# Altium footprint library WR-BHD.PcbLib: 220 footprints (part 6 of 14)
Each footprint in its own frame and in the unit in brackets; x right, y up, seen from the top. Pads: shape width x height; smd on the part's side, far side on the other; paste and mask are expansions set on the pad; w line width, h text height; cw(c..) or ccw(c..) is an arc to the next point about the centre after c.
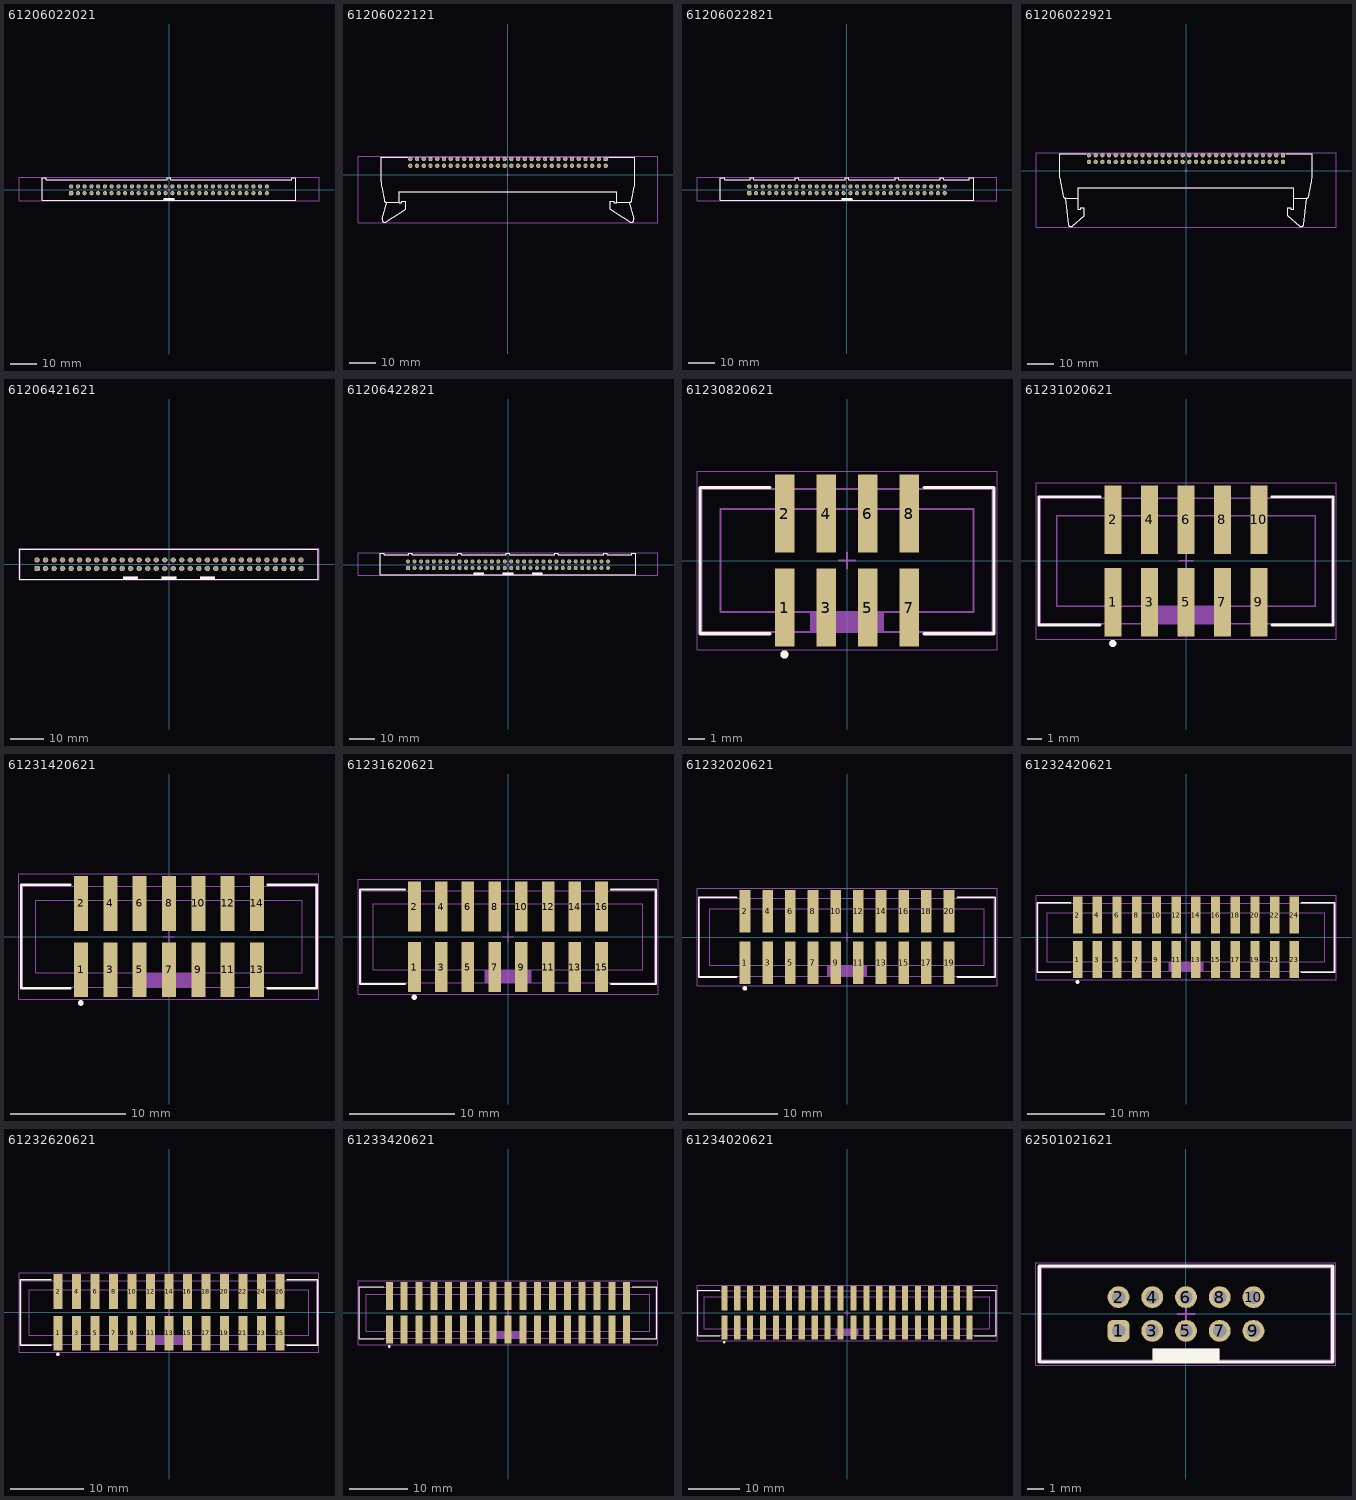
[diagram p5: the footprints below, top view; thin cyan lines are the x and y axes]

## 61206022021 [mm] "60 pins, straight, short lever, gold plating"
height 24.5
pads (60):
  rrect50% 1.6x1.6 hole 1.02: 1(-36.83,-1.27)
  round 1.6 hole 1.02: 2(-36.83,1.27) 3(-34.29,-1.27) 4(-34.29,1.27) 5(-31.75,-1.27) 6(-31.75,1.27) 7(-29.21,-1.27) 8(-29.21,1.27) 9(-26.67,-1.27) 10(-26.67,1.27) 11(-24.13,-1.27) 12(-24.13,1.27) 13(-21.59,-1.27) 14(-21.59,1.27) 15(-19.05,-1.27) 16(-19.05,1.27) 17(-16.51,-1.27) 18(-16.51,1.27) 19(-13.97,-1.27) 20(-13.97,1.27) 21(-11.43,-1.27) 22(-11.43,1.27) 23(-8.89,-1.27) 24(-8.89,1.27) 25(-6.35,-1.27) 26(-6.35,1.27) 27(-3.81,-1.27) 28(-3.81,1.27) 29(-1.27,-1.27) 30(-1.27,1.27) 31(1.27,-1.27) 32(1.27,1.27) 33(3.81,-1.27) 34(3.81,1.27) 35(6.35,-1.27) 36(6.35,1.27) 37(8.89,-1.27) 38(8.89,1.27) 39(11.43,-1.27) 40(11.43,1.27) 41(13.97,-1.27) 42(13.97,1.27) 43(16.51,-1.27) 44(16.51,1.27) 45(19.05,-1.27) 46(19.05,1.27) 47(21.59,-1.27) 48(21.59,1.27) 49(24.13,-1.27) 50(24.13,1.27) 51(26.67,-1.27) 52(26.67,1.27) 53(29.21,-1.27) 54(29.21,1.27) 55(31.75,-1.27) 56(31.75,1.27) 57(34.29,-1.27) 58(34.29,1.27) 59(36.83,-1.27) 60(36.83,1.27)
Top Overlay:
  rectangle: -2.1,-3.85 2.1,-3.05
  lines w0.2: -0.7,4.45 0.7,4.45 0.7,3.85 46.2,3.85 46.2,4.45 47.75,4.45 47.75,-3.85 -47.75,-3.85 -47.75,4.45 -46.2,4.45 -46.2,3.85 -0.7,3.85 -0.7,4.45 ; -0.7,4.45 -0.7,4.45
Top Assembly:
  rectangle: -2.1,-3.85 2.1,-3.05
  lines w0.1: -0.7,4.45 -0.7,3.85 -46.2,3.85 -46.2,4.45 -47.75,4.45 -47.75,-3.85 47.75,-3.85 47.75,4.45 46.2,4.45 46.2,3.85 0.7,3.85 0.7,4.45 -0.7,4.45 ; -0.7,4.45 -0.7,4.45
Top Designator:
  text ".Designator" at -3.647,-0.357 h1
Top 3D Body:
  rectangle: -2.1,-3.85 2.1,-3.05
  lines w0.1: -0.7,4.45 0.7,4.45 0.7,3.85 46.2,3.85 46.2,4.45 47.75,4.45 47.75,-3.85 -47.75,-3.85 -47.75,4.45 -46.2,4.45 -46.2,3.85 -0.7,3.85 -0.7,4.45 ; -0.7,4.45 -0.7,4.45
Top Courtyard:
  lines w0.05: -56.45,-4.05 -56.45,4.65 56.45,4.65 56.45,-4.05 -56.45,-4.05
Top Component Center:
  lines w0.1: -0.5,0 0.5,0 ; 0,-0.5 0,0.5
3D body "61206022021.stp": height 24.55, standoff -3.35, extent -47.849,-3.85 47.851,4.45

## 61206022121 [mm] "60 pins, right angeled, short lever, gold plating"
height 8.3
pads (60):
  rrect50% 1.65x1.65 hole 1.1: 1(36.83,5.88)
  round 1.65 hole 1.1: 2(36.83,3.34) 3(34.29,5.88) 4(34.29,3.34) 5(31.75,5.88) 6(31.75,3.34) 7(29.21,5.88) 8(29.21,3.34) 9(26.67,5.88) 10(26.67,3.34) 11(24.13,5.88) 12(24.13,3.34) 13(21.59,5.88) 14(21.59,3.34) 15(19.05,5.88) 16(19.05,3.34) 17(16.51,5.88) 18(16.51,3.34) 19(13.97,5.88) 20(13.97,3.34) 21(11.43,5.88) 22(11.43,3.34) 23(8.89,5.88) 24(8.89,3.34) 25(6.35,5.88) 26(6.35,3.34) 27(3.81,5.88) 28(3.81,3.34) 29(1.27,5.88) 30(1.27,3.34) 31(-1.27,5.88) 32(-1.27,3.34) 33(-3.81,5.88) 34(-3.81,3.34) 35(-6.35,5.88) 36(-6.35,3.34) 37(-8.89,5.88) 38(-8.89,3.34) 39(-11.43,5.88) 40(-11.43,3.34) 41(-13.97,5.88) 42(-13.97,3.34) 43(-16.51,5.88) 44(-16.51,3.34) 45(-19.05,5.88) 46(-19.05,3.34) 47(-21.59,5.88) 48(-21.59,3.34) 49(-24.13,5.88) 50(-24.13,3.34) 51(-26.67,5.88) 52(-26.67,3.34) 53(-29.21,5.88) 54(-29.21,3.34) 55(-31.75,5.88) 56(-31.75,3.34) 57(-34.29,5.88) 58(-34.29,3.34) 59(-36.83,5.88) 60(-36.83,3.34)
Top Overlay:
  lines w0.2: -46.714,-9.501 -47.656,-4.611 cw(c-37.85,-2.65) -47.85,-2.65 -47.85,6.5 -37.75,6.5 ; -46.71,-9.5 ccw(c-45.71,-9.5) -45.71,-10.5 ; -45.805,-10.5 -41.05,-10.5 ; -45.624,-10.601 -47.457,-16.691 ccw(c-46.5,-16.98) -45.95,-17.815 -38.55,-13.08 -38.55,-9.98 -40.05,-9.98 -40.05,-10.69 -41.05,-10.69 -41.05,-6.5 41.05,-6.5 41.05,-10.69 40.05,-10.69 40.05,-9.98 38.55,-9.98 38.55,-13.08 45.95,-17.816 ccw(c46.5,-16.98) 47.457,-16.691 45.624,-10.601 ; 38,6.5 47.85,6.5 47.85,-2.65 cw(c37.85,-2.65) 47.656,-4.611 46.714,-9.501 ; 41.05,-10.5 45.805,-10.5 ; 45.71,-10.5 ccw(c45.71,-9.5) 46.71,-9.5
Top Assembly:
  lines w0.1: -46.714,-9.501 -47.656,-4.611 cw(c-37.85,-2.65) -47.85,-2.65 -47.85,6.5 47.85,6.5 47.85,-2.65 cw(c37.85,-2.65) 47.656,-4.611 46.714,-9.501 ; -46.71,-9.5 ccw(c-45.71,-9.5) -45.71,-10.5 ; -45.805,-10.5 -41.05,-10.5 ; -45.624,-10.601 -47.457,-16.691 ccw(c-46.5,-16.98) -45.95,-17.815 -38.55,-13.08 -38.55,-9.98 -40.05,-9.98 -40.05,-10.69 -41.05,-10.69 -41.05,-6.5 41.05,-6.5 41.05,-10.69 40.05,-10.69 40.05,-9.98 38.55,-9.98 38.55,-13.08 45.95,-17.816 ccw(c46.5,-16.98) 47.457,-16.691 45.624,-10.601 ; 41.05,-10.5 45.805,-10.5 ; 45.71,-10.5 ccw(c45.71,-9.5) 46.71,-9.5
Top Designator:
  text ".Designator" at -3.647,-0.357 h1
Top 3D Body:
  lines w0.1: -46.714,-9.501 -47.656,-4.611 cw(c-37.85,-2.65) -47.85,-2.65 -47.85,6.5 47.85,6.5 47.85,-2.65 cw(c37.85,-2.65) 47.656,-4.611 46.714,-9.501 ; -46.71,-9.5 ccw(c-45.71,-9.5) -45.71,-10.5 ; -45.805,-10.5 -41.05,-10.5 ; -45.624,-10.601 -47.457,-16.691 ccw(c-46.5,-16.98) -45.95,-17.815 -38.55,-13.08 -38.55,-9.98 -40.05,-9.98 -40.05,-10.69 -41.05,-10.69 -41.05,-6.5 41.05,-6.5 41.05,-10.69 40.05,-10.69 40.05,-9.98 38.55,-9.98 38.55,-13.08 45.95,-17.816 ccw(c46.5,-16.98) 47.457,-16.691 45.624,-10.601 ; 41.05,-10.5 45.805,-10.5 ; 45.71,-10.5 ccw(c45.71,-9.5) 46.71,-9.5
Top Courtyard:
  lines w0.05: -56.55,-18.2 -56.55,6.88 56.55,6.88 56.55,-18.2 -56.55,-18.2
Top Component Center:
  lines w0.1: -0.5,0 0.5,0 ; 0,-0.5 0,0.5
3D body "61206022121.stp": height 8.35, standoff -3.35, extent -47.85,-18 47.85,6.5

## 61206022821 [mm] "60 pins, straight, long lever, gold plating"
height 28
pads (60):
  rrect50% 1.6x1.6 hole 1.02: 1(-36.83,-1.27)
  round 1.6 hole 1.02: 2(-36.83,1.27) 3(-34.29,-1.27) 4(-34.29,1.27) 5(-31.75,-1.27) 6(-31.75,1.27) 7(-29.21,-1.27) 8(-29.21,1.27) 9(-26.67,-1.27) 10(-26.67,1.27) 11(-24.13,-1.27) 12(-24.13,1.27) 13(-21.59,-1.27) 14(-21.59,1.27) 15(-19.05,-1.27) 16(-19.05,1.27) 17(-16.51,-1.27) 18(-16.51,1.27) 19(-13.97,-1.27) 20(-13.97,1.27) 21(-11.43,-1.27) 22(-11.43,1.27) 23(-8.89,-1.27) 24(-8.89,1.27) 25(-6.35,-1.27) 26(-6.35,1.27) 27(-3.81,-1.27) 28(-3.81,1.27) 29(-1.27,-1.27) 30(-1.27,1.27) 31(1.27,-1.27) 32(1.27,1.27) 33(3.81,-1.27) 34(3.81,1.27) 35(6.35,-1.27) 36(6.35,1.27) 37(8.89,-1.27) 38(8.89,1.27) 39(11.43,-1.27) 40(11.43,1.27) 41(13.97,-1.27) 42(13.97,1.27) 43(16.51,-1.27) 44(16.51,1.27) 45(19.05,-1.27) 46(19.05,1.27) 47(21.59,-1.27) 48(21.59,1.27) 49(24.13,-1.27) 50(24.13,1.27) 51(26.67,-1.27) 52(26.67,1.27) 53(29.21,-1.27) 54(29.21,1.27) 55(31.75,-1.27) 56(31.75,1.27) 57(34.29,-1.27) 58(34.29,1.27) 59(36.83,-1.27) 60(36.83,1.27)
Top Overlay:
  rectangle: -2.1,-3.85 2.1,-3.04
  lines w0.2: -47.85,-3.85 -47.85,4.45 -46.12,4.45 -46.12,3.85 -36.55,3.85 -36.55,4.45 -35.15,4.45 -35.15,3.85 -19.5,3.85 -19.5,4.45 -18.1,4.45 -18.1,3.85 -0.7,3.85 -0.7,4.45 0.7,4.45 0.7,3.85 18.1,3.85 18.1,4.45 19.5,4.45 19.5,3.85 35.15,3.85 35.15,4.45 36.55,4.45 36.55,3.85 46.12,3.85 46.12,4.45 47.85,4.45 47.85,-3.85 -47.85,-3.85
Top Assembly:
  rectangle: -2.1,-3.85 2.1,-3.04
  lines w0.1: -47.85,-3.85 47.85,-3.85 47.85,4.45 46.12,4.45 46.12,3.85 36.55,3.85 36.55,4.45 35.15,4.45 35.15,3.85 19.5,3.85 19.5,4.45 18.1,4.45 18.1,3.85 0.7,3.85 0.7,4.45 -0.7,4.45 -0.7,3.85 -18.1,3.85 -18.1,4.45 -19.5,4.45 -19.5,3.85 -35.15,3.85 -35.15,4.45 -36.55,4.45 -36.55,3.85 -46.12,3.85 -46.12,4.45 -47.85,4.45 -47.85,-3.85
Top Designator:
  text ".Designator" at -3.647,-0.357 h1
Top 3D Body:
  rectangle: -2.1,-3.85 2.1,-3.04
  lines w0.1: -47.85,-3.85 -47.85,4.45 -46.12,4.45 -46.12,3.85 -36.55,3.85 -36.55,4.45 -35.15,4.45 -35.15,3.85 -19.5,3.85 -19.5,4.45 -18.1,4.45 -18.1,3.85 -0.7,3.85 -0.7,4.45 0.7,4.45 0.7,3.85 18.1,3.85 18.1,4.45 19.5,4.45 19.5,3.85 35.15,3.85 35.15,4.45 36.55,4.45 36.55,3.85 46.12,3.85 46.12,4.45 47.85,4.45 47.85,-3.85 -47.85,-3.85
Top Courtyard:
  lines w0.05: -56.55,-4.05 56.55,-4.05 56.55,4.65 -56.55,4.65 -56.55,-4.05
Top Component Center:
  lines w0.1: -0.5,0 0.5,0 ; 0,-0.5 0,0.5
3D body "61206022821 (rev1).stp": height 27.84, standoff -3.35, extent -47.85,-3.86 47.85,4.45

## 61206022921 [mm] "60 pins, right angeled, long lever, gold plating"
height 10.8
pads (60):
  rrect50% 1.65x1.65 hole 1.1: 1(36.83,5.88)
  round 1.65 hole 1.1: 2(36.83,3.34) 3(34.29,5.88) 4(34.29,3.34) 5(31.75,5.88) 6(31.75,3.34) 7(29.21,5.88) 8(29.21,3.34) 9(26.67,5.88) 10(26.67,3.34) 11(24.13,5.88) 12(24.13,3.34) 13(21.59,5.88) 14(21.59,3.34) 15(19.05,5.88) 16(19.05,3.34) 17(16.51,5.88) 18(16.51,3.34) 19(13.97,5.88) 20(13.97,3.34) 21(11.43,5.88) 22(11.43,3.34) 23(8.89,5.88) 24(8.89,3.34) 25(6.35,5.88) 26(6.35,3.34) 27(3.81,5.88) 28(3.81,3.34) 29(1.27,5.88) 30(1.27,3.34) 31(-1.27,5.88) 32(-1.27,3.34) 33(-3.81,5.88) 34(-3.81,3.34) 35(-6.35,5.88) 36(-6.35,3.34) 37(-8.89,5.88) 38(-8.89,3.34) 39(-11.43,5.88) 40(-11.43,3.34) 41(-13.97,5.88) 42(-13.97,3.34) 43(-16.51,5.88) 44(-16.51,3.34) 45(-19.05,5.88) 46(-19.05,3.34) 47(-21.59,5.88) 48(-21.59,3.34) 49(-24.13,5.88) 50(-24.13,3.34) 51(-26.67,5.88) 52(-26.67,3.34) 53(-29.21,5.88) 54(-29.21,3.34) 55(-31.75,5.88) 56(-31.75,3.34) 57(-34.29,5.88) 58(-34.29,3.34) 59(-36.83,5.88) 60(-36.83,3.34)
Top Overlay:
  lines w0.2: -47.85,-2.81 -47.85,6.5 -37.8,6.5 ; -47.846,-2.81 ccw(c-37.85,-2.51) -47.604,-4.714 -46.559,-9.884 ; -46.554,-9.883 ccw(c-45.63,-9.5) -45.63,-10.5 -40.95,-10.5 ; -45.814,-10.5 -44.668,-20.372 ccw(c-43.68,-20.22) -43.022,-20.973 -38.551,-17.109 ; -38.55,-17.11 -38.55,-14.01 -40.05,-14.01 -40.05,-14.72 -40.95,-14.72 -40.95,-6.5 40.95,-6.5 40.95,-14.72 40.05,-14.72 40.05,-14.01 38.55,-14.01 38.55,-17.11 ; 38,6.5 47.85,6.5 47.85,-2.81 ; 38.551,-17.109 43.022,-20.973 ccw(c43.68,-20.22) 44.668,-20.372 45.814,-10.5 ; 40.95,-10.5 45.63,-10.5 ccw(c45.63,-9.5) 46.554,-9.883 ; 46.559,-9.884 47.604,-4.714 ccw(c37.85,-2.51) 47.846,-2.81
Top Assembly:
  lines w0.1: -47.85,-2.81 -47.85,6.5 47.85,6.5 47.85,-2.81 ; -47.846,-2.81 ccw(c-37.85,-2.51) -47.604,-4.714 -46.559,-9.884 ; -46.554,-9.883 ccw(c-45.63,-9.5) -45.63,-10.5 -40.95,-10.5 ; -45.814,-10.5 -44.668,-20.372 ccw(c-43.68,-20.22) -43.022,-20.973 -38.551,-17.109 ; -38.55,-17.11 -38.55,-14.01 -40.05,-14.01 -40.05,-14.72 -40.95,-14.72 -40.95,-6.5 40.95,-6.5 40.95,-14.72 40.05,-14.72 40.05,-14.01 38.55,-14.01 38.55,-17.11 ; 38.551,-17.109 43.022,-20.973 ccw(c43.68,-20.22) 44.668,-20.372 45.814,-10.5 ; 40.95,-10.5 45.63,-10.5 ccw(c45.63,-9.5) 46.554,-9.883 ; 46.559,-9.884 47.604,-4.714 ccw(c37.85,-2.51) 47.846,-2.81
Top Designator:
  text ".Designator" at -3.647,-0.357 h1
Top 3D Body:
  lines w0.1: -47.85,-2.81 -47.85,6.5 47.85,6.5 47.85,-2.81 ; -47.846,-2.81 ccw(c-37.85,-2.51) -47.604,-4.714 -46.559,-9.884 ; -46.554,-9.883 ccw(c-45.63,-9.5) -45.63,-10.5 -40.95,-10.5 ; -45.814,-10.5 -44.668,-20.372 ccw(c-43.68,-20.22) -43.022,-20.973 -38.551,-17.109 ; -38.55,-17.11 -38.55,-14.01 -40.05,-14.01 -40.05,-14.72 -40.95,-14.72 -40.95,-6.5 40.95,-6.5 40.95,-14.72 40.05,-14.72 40.05,-14.01 38.55,-14.01 38.55,-17.11 ; 38.551,-17.109 43.022,-20.973 ccw(c43.68,-20.22) 44.668,-20.372 45.814,-10.5 ; 40.95,-10.5 45.63,-10.5 ccw(c45.63,-9.5) 46.554,-9.883 ; 46.559,-9.884 47.604,-4.714 ccw(c37.85,-2.51) 47.846,-2.81
Top Courtyard:
  lines w0.05: -56.95,-21.41 56.95,-21.41 56.95,6.88 -56.95,6.88 -56.95,-21.41
Top Component Center:
  lines w0.1: -0.5,0 0.5,0 ; 0,-0.5 0,0.5
3D body "61206022921 (rev1).stp": height 8.35, standoff -2.35, extent -47.85,-21.221 47.85,6.5

## 61206421621 [mm] "64 pins, straight, gold plating"
height 9.1
pads (64):
  rrect50% 1.6x1.6 hole 1.1: 1(-39.37,-1.27)
  round 1.6 hole 1.1: 2(-39.37,1.27) 3(-36.83,-1.27) 4(-36.83,1.27) 5(-34.29,-1.27) 6(-34.29,1.27) 7(-31.75,-1.27) 8(-31.75,1.27) 9(-29.21,-1.27) 10(-29.21,1.27) 11(-26.67,-1.27) 12(-26.67,1.27) 13(-24.13,-1.27) 14(-24.13,1.27) 15(-21.59,-1.27) 16(-21.59,1.27) 17(-19.05,-1.27) 18(-19.05,1.27) 19(-16.51,-1.27) 20(-16.51,1.27) 21(-13.97,-1.27) 22(-13.97,1.27) 23(-11.43,-1.27) 24(-11.43,1.27) 25(-8.89,-1.27) 26(-8.89,1.27) 27(-6.35,-1.27) 28(-6.35,1.27) 29(-3.81,-1.27) 30(-3.81,1.27) 31(-1.27,-1.27) 32(-1.27,1.27) 33(1.27,-1.27) 34(1.27,1.27) 35(3.81,-1.27) 36(3.81,1.27) 37(6.35,-1.27) 38(6.35,1.27) 39(8.89,-1.27) 40(8.89,1.27) 41(11.43,-1.27) 42(11.43,1.27) 43(13.97,-1.27) 44(13.97,1.27) 45(16.51,-1.27) 46(16.51,1.27) 47(19.05,-1.27) 48(19.05,1.27) 49(21.59,-1.27) 50(21.59,1.27) 51(24.13,-1.27) 52(24.13,1.27) 53(26.67,-1.27) 54(26.67,1.27) 55(29.21,-1.27) 56(29.21,1.27) 57(31.75,-1.27) 58(31.75,1.27) 59(34.29,-1.27) 60(34.29,1.27) 61(36.83,-1.27) 62(36.83,1.27) 63(39.37,-1.27) 64(39.37,1.27)
Top Overlay:
  rectangle: -2.25,-4.5 2.25,-3.7
  rectangle: -13.68,-4.5 -9.18,-3.7
  rectangle: 9.18,-4.5 13.68,-3.7
  lines w0.2: -44.57,-4.5 44.57,-4.5 44.57,4.5 -44.57,4.5 -44.57,-4.5
Top Assembly:
  rectangle: -2.25,-4.425 2.25,-3.7
  rectangle: -13.68,-4.425 -9.18,-3.7
  rectangle: 9.18,-4.425 13.68,-3.7
  lines w0.1: -44.47,-4.425 -44.47,4.425 44.47,4.425 44.47,-4.425 -44.47,-4.425
Top Designator:
  text ".Designator" at -3.647,-0.357 h1
Top 3D Body:
  rectangle: 9.18,-4.425 13.68,-3.7
  rectangle: -13.68,-4.425 -9.18,-3.7
  rectangle: -2.25,-4.425 2.25,-3.7
  lines w0.1: -44.47,-4.425 44.47,-4.425 44.47,4.425 -44.47,4.425 -44.47,-4.425
Top Courtyard:
  lines w0.05: -44.77,-4.7 44.77,-4.7 44.77,4.85 -44.77,4.85 -44.77,-4.7
Top Component Center:
  lines w0.1: -0.5,0 0.5,0 ; 0,-0.5 0,0.5
3D body "61206421621.stp": height 9.13, standoff -2.98, extent -44.47,-4.425 44.47,4.75

## 61206422821 [mm] "64 pins, straight, long lever, gold plating"
height 28
pads (64):
  rrect50% 1.6x1.6 hole 1.02: 1(-39.37,-1.27)
  round 1.6 hole 1.02: 2(-39.37,1.27) 3(-36.83,-1.27) 4(-36.83,1.27) 5(-34.29,-1.27) 6(-34.29,1.27) 7(-31.75,-1.27) 8(-31.75,1.27) 9(-29.21,-1.27) 10(-29.21,1.27) 11(-26.67,-1.27) 12(-26.67,1.27) 13(-24.13,-1.27) 14(-24.13,1.27) 15(-21.59,-1.27) 16(-21.59,1.27) 17(-19.05,-1.27) 18(-19.05,1.27) 19(-16.51,-1.27) 20(-16.51,1.27) 21(-13.97,-1.27) 22(-13.97,1.27) 23(-11.43,-1.27) 24(-11.43,1.27) 25(-8.89,-1.27) 26(-8.89,1.27) 27(-6.35,-1.27) 28(-6.35,1.27) 29(-3.81,-1.27) 30(-3.81,1.27) 31(-1.27,-1.27) 32(-1.27,1.27) 33(1.27,-1.27) 34(1.27,1.27) 35(3.81,-1.27) 36(3.81,1.27) 37(6.35,-1.27) 38(6.35,1.27) 39(8.89,-1.27) 40(8.89,1.27) 41(11.43,-1.27) 42(11.43,1.27) 43(13.97,-1.27) 44(13.97,1.27) 45(16.51,-1.27) 46(16.51,1.27) 47(19.05,-1.27) 48(19.05,1.27) 49(21.59,-1.27) 50(21.59,1.27) 51(24.13,-1.27) 52(24.13,1.27) 53(26.67,-1.27) 54(26.67,1.27) 55(29.21,-1.27) 56(29.21,1.27) 57(31.75,-1.27) 58(31.75,1.27) 59(34.29,-1.27) 60(34.29,1.27) 61(36.83,-1.27) 62(36.83,1.27) 63(39.37,-1.27) 64(39.37,1.27)
Top Overlay:
  rectangle: 9.36,-3.85 13.56,-3.04
  rectangle: -13.56,-3.85 -9.36,-3.04
  rectangle: -2.1,-3.85 2.1,-3.04
  lines w0.2: -50.39,-3.85 -50.39,4.45 -48.66,4.45 -48.66,3.85 -39.09,3.85 -39.09,4.45 -37.69,4.45 -37.69,3.85 -19.8,3.85 -19.8,4.45 -18.4,4.45 -18.4,3.85 -0.7,3.85 -0.7,4.45 0.7,4.45 0.7,3.85 18.4,3.85 18.4,4.45 19.8,4.45 19.8,3.85 37.69,3.85 37.69,4.45 39.09,4.45 39.09,3.85 48.66,3.85 48.66,4.45 50.39,4.45 50.39,-3.85 -50.39,-3.85
Top Assembly:
  rectangle: -2.1,-3.85 2.1,-3.04
  rectangle: -13.56,-3.85 -9.36,-3.04
  rectangle: 9.36,-3.85 13.56,-3.04
  lines w0.1: -50.39,-3.85 50.39,-3.85 50.39,4.45 48.66,4.45 48.66,3.85 39.09,3.85 39.09,4.45 37.69,4.45 37.69,3.85 19.8,3.85 19.8,4.45 18.4,4.45 18.4,3.85 0.7,3.85 0.7,4.45 -0.7,4.45 -0.7,3.85 -18.4,3.85 -18.4,4.45 -19.8,4.45 -19.8,3.85 -37.69,3.85 -37.69,4.45 -39.09,4.45 -39.09,3.85 -48.66,3.85 -48.66,4.45 -50.39,4.45 -50.39,-3.85
Top Designator:
  text ".Designator" at -3.647,-0.357 h1
Top 3D Body:
  rectangle: 9.36,-3.85 13.56,-3.04
  rectangle: -13.56,-3.85 -9.36,-3.04
  rectangle: -2.1,-3.85 2.1,-3.04
  lines w0.1: -50.39,-3.85 -50.39,4.45 -48.66,4.45 -48.66,3.85 -39.09,3.85 -39.09,4.45 -37.69,4.45 -37.69,3.85 -19.8,3.85 -19.8,4.45 -18.4,4.45 -18.4,3.85 -0.7,3.85 -0.7,4.45 0.7,4.45 0.7,3.85 18.4,3.85 18.4,4.45 19.8,4.45 19.8,3.85 37.69,3.85 37.69,4.45 39.09,4.45 39.09,3.85 48.66,3.85 48.66,4.45 50.39,4.45 50.39,-3.85 -50.39,-3.85
Top Courtyard:
  lines w0.05: -59.09,-4.05 59.09,-4.05 59.09,4.65 -59.09,4.65 -59.09,-4.05
Top Component Center:
  lines w0.1: -0.5,0 0.5,0 ; 0,-0.5 0,0.5
3D body "61206422821 (rev1).stp": height 27.84, standoff -3.35, extent -50.39,-3.86 50.39,4.45

## 61230820621 [mm] "WR-BHD 2.54mm Male SMT Box Header (Reel), 8p"
height 9.1
pads (8):
  rect 1.2x4.75 smd: 1(-3.81,-2.875) 2(-3.81,2.875) 3(-1.27,-2.875) 4(-1.27,2.875) 5(1.27,-2.875) 6(1.27,2.875) 7(3.81,-2.875) 8(3.81,2.875)
Top Overlay:
  circle w0.25: c-3.83,-5.75 r0.125
  lines w0.2: -4.73,-4.475 -8.99,-4.475 -8.99,4.475 -4.73,4.475 ; 4.73,-4.475 8.99,-4.475 8.99,4.475 4.73,4.475
Top Assembly:
  rectangle: -2.25,-4.375 2.25,-3.15
  lines w0.1: -8.89,-4.375 8.89,-4.375 8.89,4.375 -8.89,4.375 -8.89,-4.375 ; -7.74,-3.15 -7.74,3.15 7.74,3.15 7.74,-3.15 -7.74,-3.15
Top Designator:
  text ".Designator" at -3.647,-0.357 h1
Top 3D Body:
  rectangle: -2.25,-4.375 2.25,-3.15
  lines w0.1: -8.89,-4.375 8.89,-4.375 8.89,4.375 -8.89,4.375 -8.89,-4.375 ; -7.74,-3.15 -7.74,3.15 7.74,3.15 7.74,-3.15 -7.74,-3.15
Top Courtyard:
  lines w0.05: -9.18,-5.45 9.18,-5.45 9.18,5.45 -9.18,5.45 -9.18,-5.45
Top Component Center:
  lines w0.1: -0.5,0 0.5,0 ; 0,-0.5 0,0.5
3D body "61230820621.stp": height 11.35, standoff 0.03, extent -8.89,-4.75 8.89,4.762

## 61231020621 [mm] "WR-BHD 2.54mm Male SMT Box Header (Reel), 10p"
height 9.1
pads (10):
  rect 1.2x4.75 smd: 1(-5.08,-2.875) 2(-5.08,2.875) 3(-2.54,-2.875) 4(-2.54,2.875) 5(0,-2.875) 6(0,2.875) 7(2.54,-2.875) 8(2.54,2.875) 9(5.08,-2.875) 10(5.08,2.875)
Top Overlay:
  circle w0.25: c-5.1,-5.75 r0.125
  lines w0.2: -6,-4.475 -10.26,-4.475 -10.26,4.475 -6,4.475 ; 6,-4.475 10.26,-4.475 10.26,4.475 6,4.475
Top Assembly:
  rectangle: -2.25,-4.375 2.25,-3.15
  lines w0.1: -10.16,-4.375 10.16,-4.375 10.16,4.375 -10.16,4.375 -10.16,-4.375 ; -9.01,-3.15 -9.01,3.15 9.01,3.15 9.01,-3.15 -9.01,-3.15
Top Designator:
  text ".Designator" at -3.647,-0.357 h1
Top 3D Body:
  rectangle: -2.25,-4.375 2.25,-3.15
  lines w0.1: -10.16,-4.375 10.16,-4.375 10.16,4.375 -10.16,4.375 -10.16,-4.375 ; -9.01,-3.15 -9.01,3.15 9.01,3.15 9.01,-3.15 -9.01,-3.15
Top Courtyard:
  lines w0.05: -10.45,-5.45 10.45,-5.45 10.45,5.45 -10.45,5.45 -10.45,-5.45
Top Component Center:
  lines w0.1: -0.5,0 0.5,0 ; 0,-0.5 0,0.5
3D body "61231020621.stp": height 11.35, standoff 0.03, extent -10.16,-4.75 10.16,4.762

## 61231420621 [mm] "WR-BHD 2.54mm Male SMT Box Header (Reel), 14p"
height 9.1
pads (14):
  rect 1.2x4.75 smd: 1(-7.62,-2.875) 2(-7.62,2.875) 3(-5.08,-2.875) 4(-5.08,2.875) 5(-2.54,-2.875) 6(-2.54,2.875) 7(0,-2.875) 8(0,2.875) 9(2.54,-2.875) 10(2.54,2.875) 11(5.08,-2.875) 12(5.08,2.875) 13(7.62,-2.875) 14(7.62,2.875)
Top Overlay:
  circle w0.25: c-7.64,-5.75 r0.125
  lines w0.2: -8.54,-4.475 -12.8,-4.475 -12.8,4.475 -8.54,4.475 ; 8.54,-4.475 12.8,-4.475 12.8,4.475 8.54,4.475
Top Assembly:
  rectangle: -2.25,-4.375 2.25,-3.15
  lines w0.1: -12.7,-4.375 12.7,-4.375 12.7,4.375 -12.7,4.375 -12.7,-4.375 ; -11.55,-3.15 -11.55,3.15 11.55,3.15 11.55,-3.15 -11.55,-3.15
Top Designator:
  text ".Designator" at -3.647,-0.357 h1
Top 3D Body:
  rectangle: -2.25,-4.375 2.25,-3.15
  lines w0.1: -12.7,-4.375 12.7,-4.375 12.7,4.375 -12.7,4.375 -12.7,-4.375 ; -11.55,-3.15 -11.55,3.15 11.55,3.15 11.55,-3.15 -11.55,-3.15
Top Courtyard:
  lines w0.05: -12.99,-5.45 12.99,-5.45 12.99,5.45 -12.99,5.45 -12.99,-5.45
Top Component Center:
  lines w0.1: -0.5,0 0.5,0 ; 0,-0.5 0,0.5
3D body "61231420621.stp": height 11.35, standoff 0.03, extent -12.7,-4.75 12.7,4.88

## 61231620621 [mm] "WR-BHD 2.54mm Male SMT Box Header (Reel), 16p"
height 9.1
pads (16):
  rect 1.2x4.75 smd: 1(-8.89,-2.875) 2(-8.89,2.875) 3(-6.35,-2.875) 4(-6.35,2.875) 5(-3.81,-2.875) 6(-3.81,2.875) 7(-1.27,-2.875) 8(-1.27,2.875) 9(1.27,-2.875) 10(1.27,2.875) 11(3.81,-2.875) 12(3.81,2.875) 13(6.35,-2.875) 14(6.35,2.875) 15(8.89,-2.875) 16(8.89,2.875)
Top Overlay:
  circle w0.25: c-8.91,-5.75 r0.125
  lines w0.2: -9.81,-4.475 -14.07,-4.475 -14.07,4.475 -9.81,4.475 ; 9.81,-4.475 14.07,-4.475 14.07,4.475 9.81,4.475
Top Assembly:
  rectangle: -2.25,-4.375 2.25,-3.15
  lines w0.1: -13.97,-4.375 13.97,-4.375 13.97,4.375 -13.97,4.375 -13.97,-4.375 ; -12.82,-3.15 -12.82,3.15 12.82,3.15 12.82,-3.15 -12.82,-3.15
Top Designator:
  text ".Designator" at -3.647,-0.357 h1
Top 3D Body:
  rectangle: -2.25,-4.375 2.25,-3.15
  lines w0.1: -13.97,-4.375 13.97,-4.375 13.97,4.375 -13.97,4.375 -13.97,-4.375 ; -12.82,-3.15 -12.82,3.15 12.82,3.15 12.82,-3.15 -12.82,-3.15
Top Courtyard:
  lines w0.05: -14.26,-5.45 14.26,-5.45 14.26,5.45 -14.26,5.45 -14.26,-5.45
Top Component Center:
  lines w0.1: -0.5,0 0.5,0 ; 0,-0.5 0,0.5
3D body "61231620621.stp": height 11.35, standoff 0.03, extent -13.97,-4.75 13.97,4.88

## 61232020621 [mm] "WR-BHD 2.54mm Male SMT Box Header (Reel), 20p"
height 9.1
pads (20):
  rect 1.2x4.75 smd: 1(-11.43,-2.875) 2(-11.43,2.875) 3(-8.89,-2.875) 4(-8.89,2.875) 5(-6.35,-2.875) 6(-6.35,2.875) 7(-3.81,-2.875) 8(-3.81,2.875) 9(-1.27,-2.875) 10(-1.27,2.875) 11(1.27,-2.875) 12(1.27,2.875) 13(3.81,-2.875) 14(3.81,2.875) 15(6.35,-2.875) 16(6.35,2.875) 17(8.89,-2.875) 18(8.89,2.875) 19(11.43,-2.875) 20(11.43,2.875)
Top Overlay:
  circle w0.25: c-11.45,-5.75 r0.125
  lines w0.2: -12.35,-4.475 -16.61,-4.475 -16.61,4.475 -12.35,4.475 ; 12.35,-4.475 16.61,-4.475 16.61,4.475 12.35,4.475
Top Assembly:
  rectangle: -2.25,-4.375 2.25,-3.15
  lines w0.1: -16.51,-4.375 -16.51,4.375 16.51,4.375 16.51,-4.375 -16.51,-4.375 ; -15.36,-3.15 15.36,-3.15 15.36,3.15 -15.36,3.15 -15.36,-3.15
Top Designator:
  text ".Designator" at -3.647,-0.357 h1
Top 3D Body:
  rectangle: -2.25,-4.375 2.25,-3.15
  lines w0.1: -16.51,-4.375 -16.51,4.375 16.51,4.375 16.51,-4.375 -16.51,-4.375 ; -15.36,-3.15 15.36,-3.15 15.36,3.15 -15.36,3.15 -15.36,-3.15
Top Courtyard:
  lines w0.05: -16.8,-5.45 -16.8,5.45 16.8,5.45 16.8,-5.45 -16.8,-5.45
Top Component Center:
  lines w0.1: -0.5,0 0.5,0 ; 0,-0.5 0,0.5
3D body "61232020621.stp": height 11.35, standoff 0.03, extent -16.51,-4.75 16.51,4.88

## 61232420621 [mm] "WR-BHD 2.54mm Male SMT Box Header (Reel), 24p"
height 9.1
pads (24):
  rect 1.2x4.75 smd: 1(-13.97,-2.875) 2(-13.97,2.875) 3(-11.43,-2.875) 4(-11.43,2.875) 5(-8.89,-2.875) 6(-8.89,2.875) 7(-6.35,-2.875) 8(-6.35,2.875) 9(-3.81,-2.875) 10(-3.81,2.875) 11(-1.27,-2.875) 12(-1.27,2.875) 13(1.27,-2.875) 14(1.27,2.875) 15(3.81,-2.875) 16(3.81,2.875) 17(6.35,-2.875) 18(6.35,2.875) 19(8.89,-2.875) 20(8.89,2.875) 21(11.43,-2.875) 22(11.43,2.875) 23(13.97,-2.875) 24(13.97,2.875)
Top Overlay:
  circle w0.25: c-13.99,-5.75 r0.125
  lines w0.2: -14.89,-4.475 -19.15,-4.475 -19.15,4.475 -14.89,4.475 ; 14.89,-4.475 19.15,-4.475 19.15,4.475 14.89,4.475
Top Assembly:
  rectangle: -2.25,-4.375 2.25,-3.15
  lines w0.1: -19.05,-4.375 19.05,-4.375 19.05,4.375 -19.05,4.375 -19.05,-4.375 ; -17.9,-3.15 -17.9,3.15 17.9,3.15 17.9,-3.15 -17.9,-3.15
Top Designator:
  text ".Designator" at -3.647,-0.357 h1
Top 3D Body:
  rectangle: -2.25,-4.375 2.25,-3.15
  lines w0.1: -19.05,-4.375 19.05,-4.375 19.05,4.375 -19.05,4.375 -19.05,-4.375 ; -17.9,-3.15 -17.9,3.15 17.9,3.15 17.9,-3.15 -17.9,-3.15
Top Courtyard:
  lines w0.05: -19.34,-5.45 19.34,-5.45 19.34,5.45 -19.34,5.45 -19.34,-5.45
Top Component Center:
  lines w0.1: -0.5,0 0.5,0 ; 0,-0.5 0,0.5
3D body "61232420621.stp": height 11.35, standoff 0.03, extent -19.05,-4.75 19.05,4.762

## 61232620621 [mm] "WR-BHD 2.54mm Male SMT Box Header (Reel), 26p"
height 9.1
pads (26):
  rect 1.2x4.75 smd: 1(-15.24,-2.875) 2(-15.24,2.875) 3(-12.7,-2.875) 4(-12.7,2.875) 5(-10.16,-2.875) 6(-10.16,2.875) 7(-7.62,-2.875) 8(-7.62,2.875) 9(-5.08,-2.875) 10(-5.08,2.875) 11(-2.54,-2.875) 12(-2.54,2.875) 13(0,-2.875) 14(0,2.875) 15(2.54,-2.875) 16(2.54,2.875) 17(5.08,-2.875) 18(5.08,2.875) 19(7.62,-2.875) 20(7.62,2.875) 21(10.16,-2.875) 22(10.16,2.875) 23(12.7,-2.875) 24(12.7,2.875) 25(15.24,-2.875) 26(15.24,2.875)
Top Overlay:
  circle w0.25: c-15.26,-5.75 r0.125
  lines w0.2: -16.16,-4.475 -20.42,-4.475 -20.42,4.475 -16.16,4.475 ; 16.16,-4.475 20.42,-4.475 20.42,4.475 16.16,4.475
Top Assembly:
  rectangle: -2.25,-4.375 2.25,-3.15
  lines w0.1: -20.32,-4.375 -20.32,4.375 20.32,4.375 20.32,-4.375 -20.32,-4.375 ; -19.17,-3.15 19.17,-3.15 19.17,3.15 -19.17,3.15 -19.17,-3.15
Top Designator:
  text ".Designator" at -3.647,-0.357 h1
Top 3D Body:
  rectangle: -2.25,-4.375 2.25,-3.15
  lines w0.1: -20.32,-4.375 -20.32,4.375 20.32,4.375 20.32,-4.375 -20.32,-4.375 ; -19.17,-3.15 19.17,-3.15 19.17,3.15 -19.17,3.15 -19.17,-3.15
Top Courtyard:
  lines w0.05: -20.61,-5.45 -20.61,5.45 20.61,5.45 20.61,-5.45 -20.61,-5.45
Top Component Center:
  lines w0.1: -0.5,0 0.5,0 ; 0,-0.5 0,0.5
3D body "61232620621.stp": height 11.35, standoff 0.03, extent -20.32,-4.75 20.32,4.88

## 61233420621 [mm] "WR-BHD 2.54mm Male SMT Box Header (Reel), 34p"
height 9.1
pads (34):
  rect 1.2x4.75 smd: 1(-20.32,-2.875) 2(-20.32,2.875) 3(-17.78,-2.875) 4(-17.78,2.875) 5(-15.24,-2.875) 6(-15.24,2.875) 7(-12.7,-2.875) 8(-12.7,2.875) 9(-10.16,-2.875) 10(-10.16,2.875) 11(-7.62,-2.875) 12(-7.62,2.875) 13(-5.08,-2.875) 14(-5.08,2.875) 15(-2.54,-2.875) 16(-2.54,2.875) 17(0,-2.875) 18(0,2.875) 19(2.54,-2.875) 20(2.54,2.875) 21(5.08,-2.875) 22(5.08,2.875) 23(7.62,-2.875) 24(7.62,2.875) 25(10.16,-2.875) 26(10.16,2.875) 27(12.7,-2.875) 28(12.7,2.875) 29(15.24,-2.875) 30(15.24,2.875) 31(17.78,-2.875) 32(17.78,2.875) 33(20.32,-2.875) 34(20.32,2.875)
Top Overlay:
  circle w0.25: c-20.34,-5.75 r0.125
  lines w0.2: -21.24,-4.475 -25.5,-4.475 -25.5,4.475 -21.24,4.475 ; 21.24,-4.475 25.5,-4.475 25.5,4.475 21.24,4.475
Top Assembly:
  rectangle: -2.25,-4.375 2.25,-3.15
  lines w0.1: -25.4,-4.375 25.4,-4.375 25.4,4.375 -25.4,4.375 -25.4,-4.375 ; -24.25,-3.15 -24.25,3.15 24.25,3.15 24.25,-3.15 -24.25,-3.15
Top Designator:
  text ".Designator" at -3.647,-0.357 h1
Top 3D Body:
  rectangle: -2.25,-4.375 2.25,-3.15
  lines w0.1: -25.4,-4.375 25.4,-4.375 25.4,4.375 -25.4,4.375 -25.4,-4.375 ; -24.25,-3.15 -24.25,3.15 24.25,3.15 24.25,-3.15 -24.25,-3.15
Top Courtyard:
  lines w0.05: -25.69,-5.45 25.69,-5.45 25.69,5.45 -25.69,5.45 -25.69,-5.45
Top Component Center:
  lines w0.1: -0.5,0 0.5,0 ; 0,-0.5 0,0.5
3D body "61233420621.stp": height 11.35, standoff 0.03, extent -25.4,-4.75 25.4,4.88

## 61234020621 [mm] "WR-BHD 2.54mm Male SMT Box Header (Reel), 40p"
height 9.1
pads (40):
  rect 1.2x4.75 smd: 1(-24.13,-2.875) 2(-24.13,2.875) 3(-21.59,-2.875) 4(-21.59,2.875) 5(-19.05,-2.875) 6(-19.05,2.875) 7(-16.51,-2.875) 8(-16.51,2.875) 9(-13.97,-2.875) 10(-13.97,2.875) 11(-11.43,-2.875) 12(-11.43,2.875) 13(-8.89,-2.875) 14(-8.89,2.875) 15(-6.35,-2.875) 16(-6.35,2.875) 17(-3.81,-2.875) 18(-3.81,2.875) 19(-1.27,-2.875) 20(-1.27,2.875) 21(1.27,-2.875) 22(1.27,2.875) 23(3.81,-2.875) 24(3.81,2.875) 25(6.35,-2.875) 26(6.35,2.875) 27(8.89,-2.875) 28(8.89,2.875) 29(11.43,-2.875) 30(11.43,2.875) 31(13.97,-2.875) 32(13.97,2.875) 33(16.51,-2.875) 34(16.51,2.875) 35(19.05,-2.875) 36(19.05,2.875) 37(21.59,-2.875) 38(21.59,2.875) 39(24.13,-2.875) 40(24.13,2.875)
Top Overlay:
  circle w0.25: c-24.15,-5.75 r0.125
  lines w0.2: -25.05,-4.475 -29.31,-4.475 -29.31,4.475 -25.05,4.475 ; 25.05,-4.475 29.31,-4.475 29.31,4.475 25.05,4.475
Top Assembly:
  rectangle: -2.25,-4.375 2.25,-3.15
  lines w0.1: -29.21,-4.375 -29.21,4.375 29.21,4.375 29.21,-4.375 -29.21,-4.375 ; -28.06,-3.15 28.06,-3.15 28.06,3.15 -28.06,3.15 -28.06,-3.15
Top Designator:
  text ".Designator" at -3.647,-0.357 h1
Top 3D Body:
  rectangle: -2.25,-4.375 2.25,-3.15
  lines w0.1: -29.21,-4.375 -29.21,4.375 29.21,4.375 29.21,-4.375 -29.21,-4.375 ; -28.06,-3.15 28.06,-3.15 28.06,3.15 -28.06,3.15 -28.06,-3.15
Top Courtyard:
  lines w0.05: -29.5,-5.45 -29.5,5.45 29.5,5.45 29.5,-5.45 -29.5,-5.45
Top Component Center:
  lines w0.1: -0.5,0 0.5,0 ; 0,-0.5 0,0.5
3D body "61234020621.stp": height 11.35, standoff 0.03, extent -29.21,-4.75 29.21,4.88

## 62501021621 [mm] "2.00mm Male Box Header, 10p"
height 5.6
pads (10):
  rrect50% 1.3x1.3 hole 0.8: 1(-4,-1)
  round 1.3 hole 0.8: 2(-4,1) 3(-2,-1) 4(-2,1) 5(0,-1) 6(0,1) 7(2,-1) 8(2,1) 9(4,-1) 10(4,1)
Top Overlay:
  rectangle: -2,-2.85 2,-2.05
  lines w0.2: -8.7,-2.85 -8.7,2.85 8.7,2.85 8.7,-2.85 -8.7,-2.85
Top Assembly:
  rectangle: -2,-2.75 2,-2.05
  lines w0.1: -8.6,-2.75 8.6,-2.75 8.6,2.75 -8.6,2.75 -8.6,-2.75
Top Designator:
  text ".Designator" at -3.647,-0.357 h1
Top 3D Body:
  rectangle: -2,-2.75 2,-2.05
  lines w0.1: -8.6,-2.75 -8.6,2.75 8.6,2.75 8.6,-2.75 -8.6,-2.75
Top Courtyard:
  lines w0.05: -8.9,-3.05 8.9,-3.05 8.9,3.05 -8.9,3.05 -8.9,-3.05
Top Component Center:
  lines w0.1: -0.5,0 0.5,0 ; 0,-0.5 0,0.5
3D body "62501021621.stp": height 5.65, standoff -2.5, extent -8.6,-2.75 8.6,2.75